# Altium schematic symbol library Socket.SchLib: 3 symbols
Pins are listed as number, name and electrical type; pins without a type are passive.

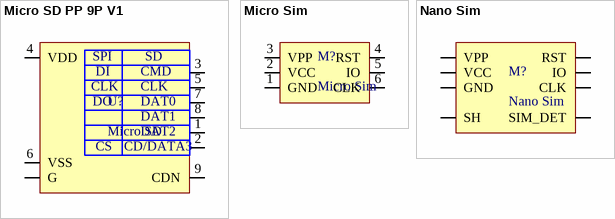
[diagram p0: symbols Micro SD PP 9P V1 to Nano Sim]

## Micro SD PP 9P V1
designator U?, comment Micro SD
MiSD-PP-9P-V1; Code: 6200-0011
footprint SDMICRO_AT (SDMICRO exist on Iran, Attend 112J-TDAR-R01 push-push)
pins: 1 DATA2|NC, 2 DATA3/CD|CS, 3 CMD|DI, 4 VDD, 5 CLK|CLK, 6 VSS, 7 DATA0, 8 DATA1, 9 CDN, SH1 G
text: SPI; SD; DI; CMD; CLK; DO; DAT0; DAT1; DAT2; CS; CD/DATA3

## Micro Sim
designator M?
MS-OL-6P-V2; Code: N/A
footprint Micro Sim (MS-OL-6P-V2)
pins: 1 GND, 2 VCC, 3 VPP, 4 RST, 5 IO, 6 CLK

## Nano Sim
designator M?
NS-PP-7P Push Push; Code: 6001-124
footprint Nano_SIM (XKNANO-113)
pins: 0 SH, C1 VCC, C2 RST, C3 CLK, C5 GND, C6 VPP, C7 IO, CD SIM_DET